# Altium footprint library TUSB320LAIRWBR.PcbLib: 1 footprints
Each footprint in its own frame and in the unit in brackets; x right, y up, seen from the top. Pads: shape width x height; smd on the part's side, far side on the other; paste and mask are expansions set on the pad; w line width, h text height; cw(c..) or ccw(c..) is an arc to the next point about the centre after c.
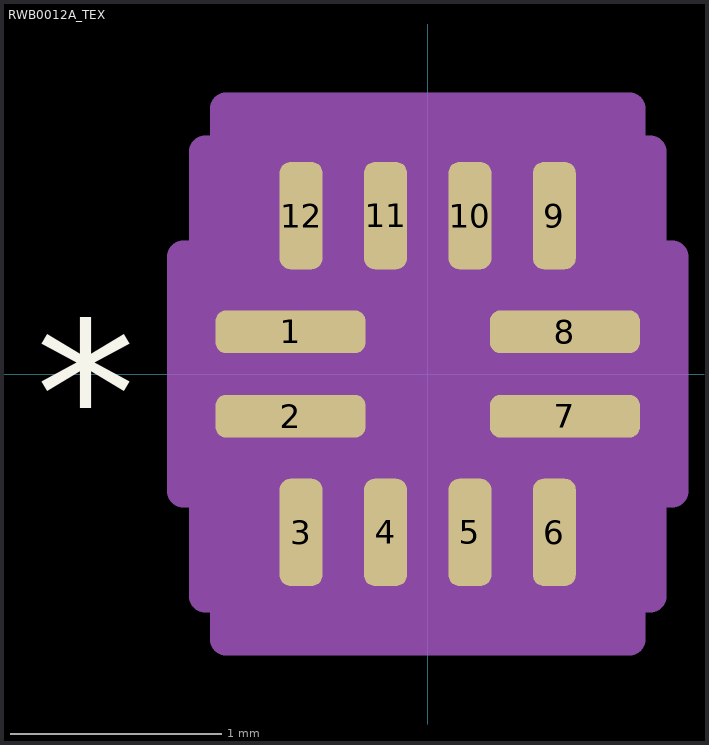
[diagram p0: the footprint, top view; thin cyan lines are the x and y axes]

## RWB0012A_TEX [mm]
pads (12):
  rrect50% 0.711x0.203 smd paste+0 mask+0.051: 1(-0.65,0.2) 2(-0.65,-0.2) 7(0.65,-0.2) 8(0.65,0.2)
  rrect50% 0.203x0.508 smd paste+0 mask+0.051: 3(-0.6,-0.75) 4(-0.2,-0.75) 5(0.2,-0.75) 6(0.6,-0.75) 9(0.6,0.75) 10(0.2,0.75) 11(-0.2,0.75) 12(-0.6,0.75)
Top Overlay:
  text "*" at -1.856,-0.435 h1.27
  text ".Designator" at -3.492,-0.635 h1.27
Mechanical 13:
  lines w0.025: -0.8,-0.47 0.47,0.8 ; -0.8,-0.8 0.8,-0.8 0.8,0.8 -0.8,0.8 -0.8,-0.8
  text ".Designator" at -3.492,-0.635 h1.27
  text "*" at -0.079,-0.435 h1.27
Mechanical 15:
  region: -0.956,-1.054 -1.054,-1.054 -1.054,-0.556 -1.158,-0.556 -1.158,0.556 -1.054,0.556 -1.054,1.054 -0.956,1.054 -0.956,1.258 0.956,1.258 0.956,1.054 1.054,1.054 1.054,0.556 1.158,0.556 1.158,-0.556 1.054,-0.556 1.054,-1.054 0.956,-1.054 0.956,-1.258 -0.956,-1.258
  lines w0.152: -1.158,-0.556 -1.054,-0.556 -1.054,-1.054 -0.956,-1.054 -0.956,-1.258 0.956,-1.258 0.956,-1.054 1.054,-1.054 1.054,-0.556 1.158,-0.556 1.158,0.556 1.054,0.556 1.054,1.054 0.956,1.054 0.956,1.258 -0.956,1.258 -0.956,1.054 -1.054,1.054 -1.054,0.556 -1.158,0.556 -1.158,-0.556
3D body "RWB0012A_TEX.step": height 0.41, standoff 0, extent -0.8,-0.8 0.8,0.8